# Altium footprint library AOD413A.PcbLib: 1 footprints
Each footprint in its own frame and in the unit in brackets; x right, y up, seen from the top. Pads: shape width x height; smd on the part's side, far side on the other; paste and mask are expansions set on the pad; w line width, h text height; cw(c..) or ccw(c..) is an arc to the next point about the centre after c.
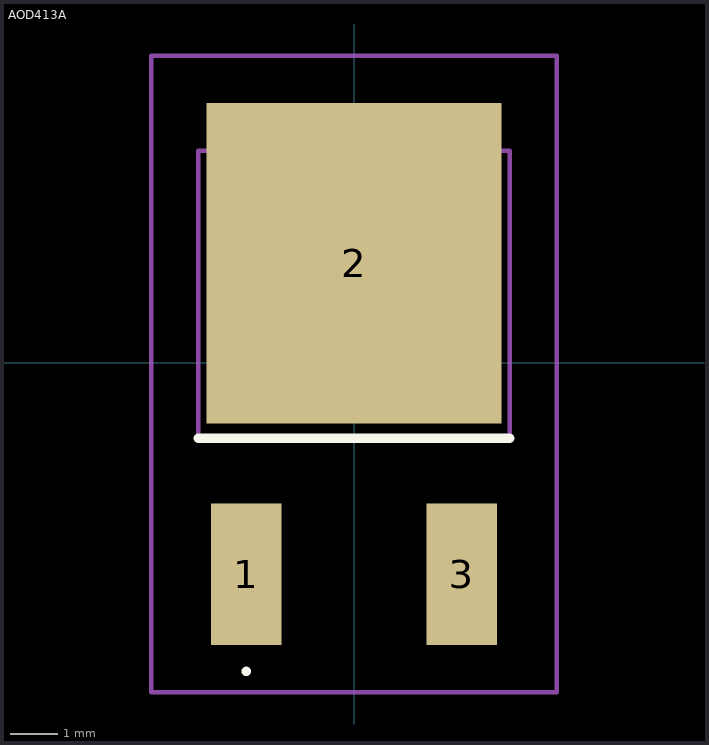
[diagram p0: the footprint, top view; thin cyan lines are the x and y axes]

## AOD413A [mm]
pads (3):
  rect 1.5x3 smd: 1(-2.286,-4.492) 3(2.286,-4.492)
  rect 6.25x6.8 smd: 2(0,2.108)
Top Overlay:
  lines w0.1: -2.286,-6.6 cw(c-2.286,-6.55) -2.286,-6.5 ; -2.286,-6.6 -2.286,-6.6 ; -2.286,-6.6 ccw(c-2.286,-6.55) -2.286,-6.5 ; -2.286,-6.5 -2.286,-6.5
  lines w0.2: -3.302,-1.604 3.302,-1.604
Mechanical 15:
  lines w0.1: -3.302,-1.604 3.302,-1.604 3.302,4.492 -3.302,4.492 -3.302,-1.604
Mechanical 20:
  lines w0.1: -4.302,-6.992 4.302,-6.992 4.302,6.508 -4.302,6.508 -4.302,-6.992